# Altium footprint library 2450AT18D0100001E.PcbLib: 1 footprints
Each footprint in its own frame and in the unit in brackets; x right, y up, seen from the top. Pads: shape width x height; smd on the part's side, far side on the other; paste and mask are expansions set on the pad; w line width, h text height; cw(c..) or ccw(c..) is an arc to the next point about the centre after c.
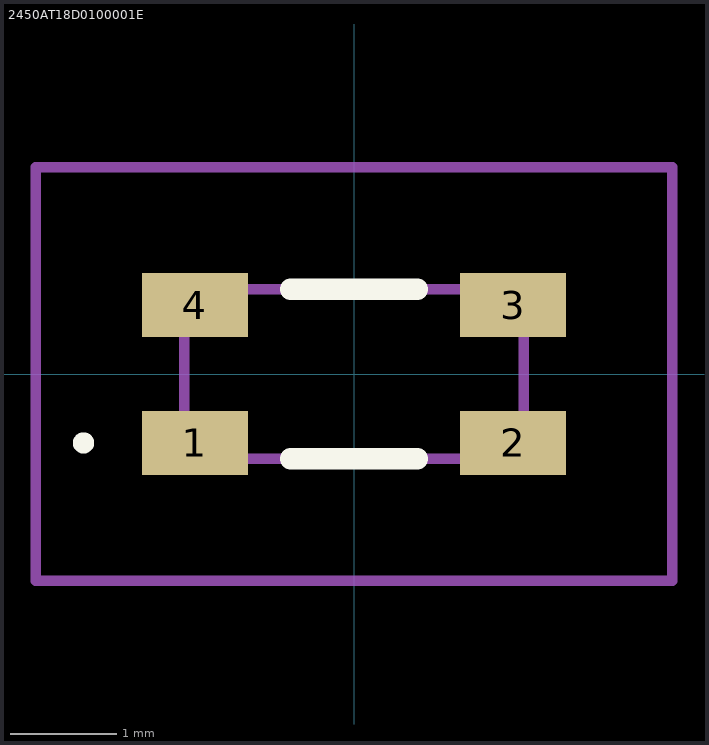
[diagram p0: the footprint, top view; thin cyan lines are the x and y axes]

## 2450AT18D0100001E [mm]
pads (4):
  rect 1x0.6 smd: 1(-1.5,-0.65) 2(1.5,-0.65) 3(1.5,0.65) 4(-1.5,0.65)
Top Overlay:
  lines w0.1: -2.6,-0.65 cw(c-2.55,-0.65) -2.5,-0.65 ; -2.6,-0.65 -2.6,-0.65 ; -2.6,-0.65 ccw(c-2.55,-0.65) -2.5,-0.65 ; -2.5,-0.65 -2.5,-0.65
  lines w0.2: -0.6,-0.8 0.6,-0.8 ; -0.6,0.8 0.6,0.8
Mechanical 15:
  lines w0.1: -1.6,-0.8 1.6,-0.8 1.6,0.8 -1.6,0.8 -1.6,-0.8
Mechanical 20:
  lines w0.1: -3,-1.95 3,-1.95 3,1.95 -3,1.95 -3,-1.95